# Altium footprint library LimeMicroAltiumLib.PcbLib: 876 footprints (part 9 of 57)
Each footprint in its own frame and in the unit in brackets; x right, y up, seen from the top. Pads: shape width x height; smd on the part's side, far side on the other; paste and mask are expansions set on the pad; w line width, h text height; cw(c..) or ccw(c..) is an arc to the next point about the centre after c.
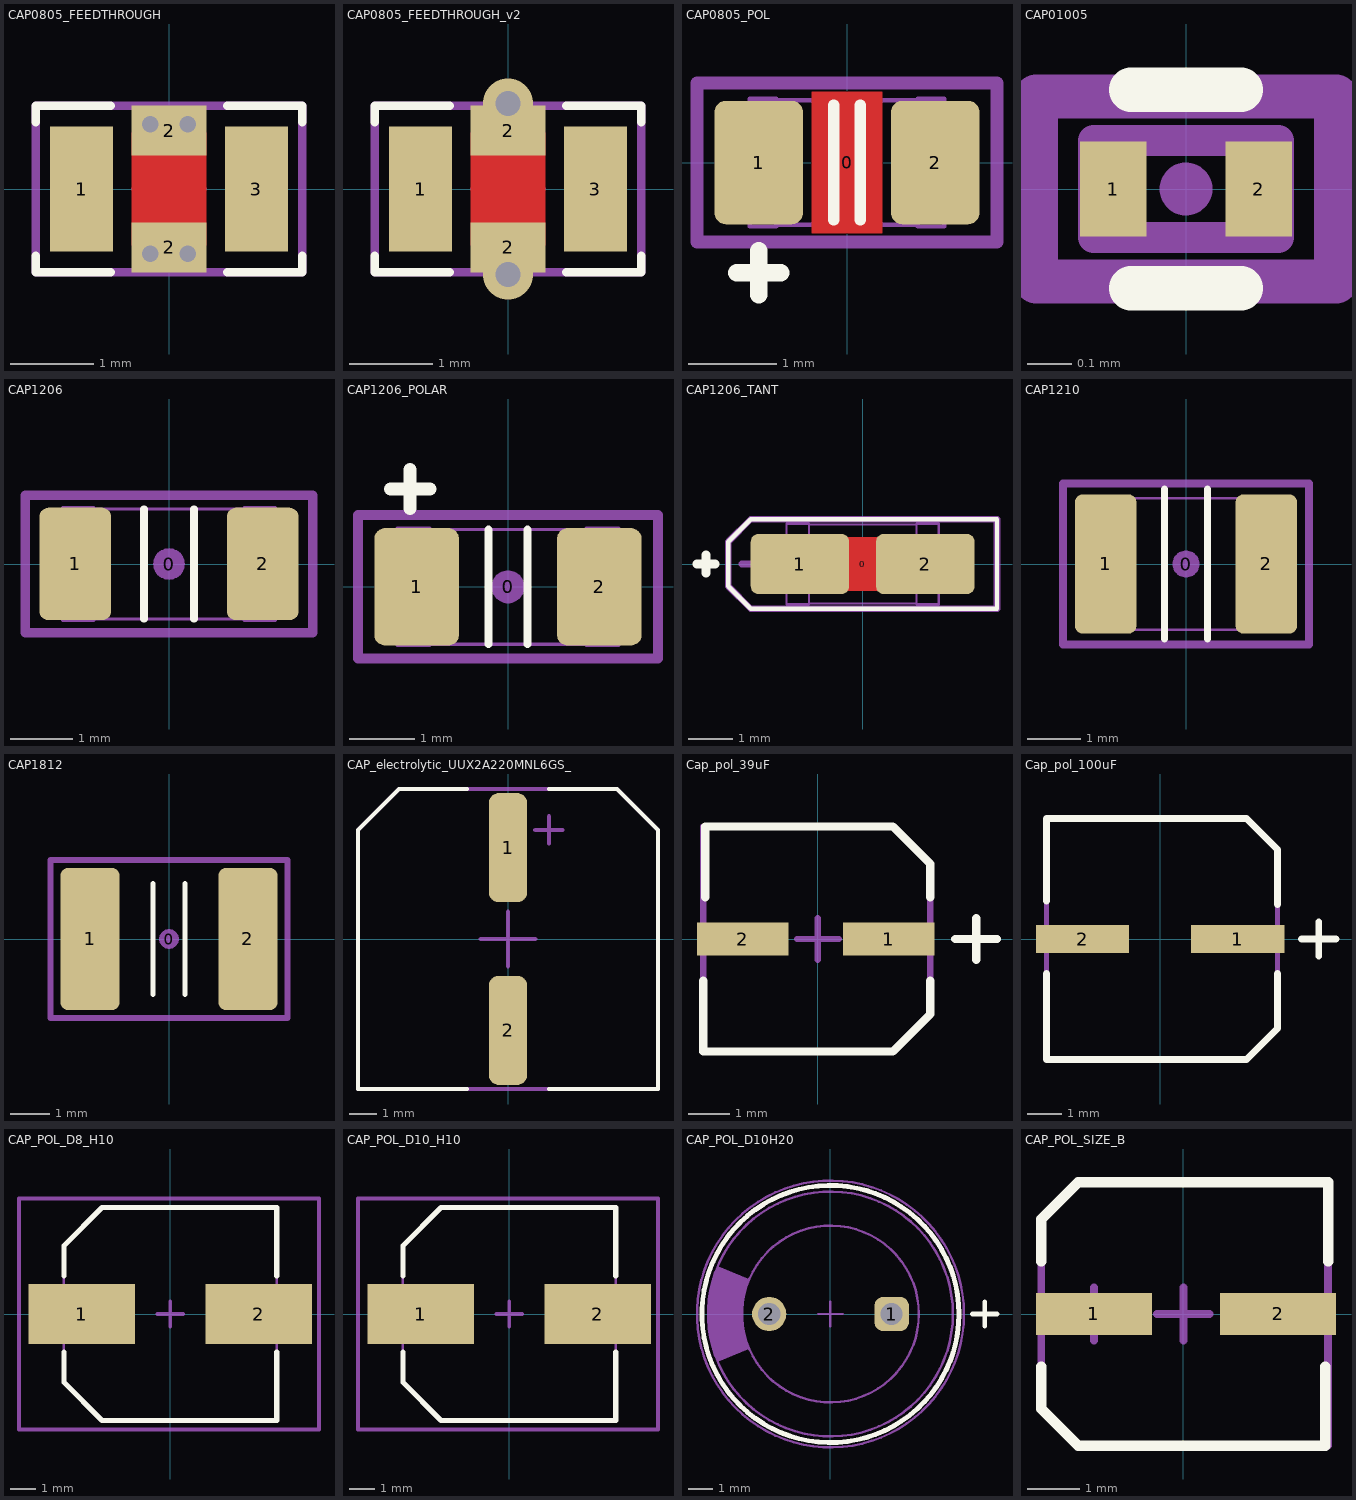
[diagram p8: the footprints below, top view; thin cyan lines are the x and y axes]

## CAP0805_FEEDTHROUGH [mm]
pads (4):
  rect 0.75x1.5 smd mask+0.05: 1(-1.05,0) 3(1.05,0)
  rect 0.9x0.6 smd mask+0.05: 2(0,-0.7) 2(0,0.7)
via 0.225,0.775 diameter 0.4 hole 0.2
via -0.225,0.775 diameter 0.4 hole 0.2
via 0.225,-0.775 diameter 0.4 hole 0.2
via -0.225,-0.775 diameter 0.4 hole 0.2
Top Layer:
  region: 0.375,0.425
  region: -0.45,-0.675 -0.45,0.675 0.45,0.675 0.45,-0.675
  region: -0.375,-0.4
Top Overlay:
  lines w0.1: -1.6,-0.8 -1.6,-1 -0.7,-1 ; -1.6,0.8 -1.6,1 -0.7,1 ; 0.7,-1 1.6,-1 1.6,-0.8 ; 0.7,1 1.6,1 1.6,0.8
Mechanical 15:
  lines w0.1: -0.4,0 0,0 ; 0,-0.4 0,0 ; 0,0.4 0,0 ; 0.4,0 0,0 ; -1.6,-1 1.6,-1 1.6,1 -1.6,1 -1.6,-1
  text ".Designator" at 0,0 h0.55
3D body "User Library-0805_3Pin_Capacitor.step": height 1.13, standoff -0.01, extent -1,-0.625 1,0.625

## CAP0805_FEEDTHROUGH_v2 [mm]
pads (4):
  rect 0.75x1.5 smd mask+0.05: 1(-1.05,0) 3(1.05,0)
  rect 0.9x0.6 smd mask+0.05: 2(0,-0.7) 2(0,0.7)
via 0,1.025 diameter 0.6 hole 0.3
via 0,-1.025 diameter 0.6 hole 0.3
Top Layer:
  region: 0.375,0.425
  region: -0.45,-0.675 -0.45,0.675 0.45,0.675 0.45,-0.675
  region: -0.375,-0.4
Top Overlay:
  lines w0.1: -1.6,-0.8 -1.6,-1 -0.7,-1 ; -1.6,0.8 -1.6,1 -0.7,1 ; 0.7,-1 1.6,-1 1.6,-0.8 ; 0.7,1 1.6,1 1.6,0.8
Mechanical 15:
  lines w0.1: -0.4,0 0,0 ; 0,-0.4 0,0 ; 0,0.4 0,0 ; 0.4,0 0,0 ; -1.6,-1 1.6,-1 1.6,1 -1.6,1 -1.6,-1
  text ".Designator" at 0,0 h0.55
3D body "User Library-0805_3Pin_Capacitor.step": height 1.13, standoff -0.01, extent -1,-0.625 1,0.625

## CAP0805_POL [mm] "Chip Capacitor, Body 2.0x1.2mm, 0805, IPC Medium Density"
height 1.2
pads (3):
  round 0.254 on Mech15: 0(0,0)
  rrect25% 1x1.4 smd: 1(-1,0) 2(1,0)
Top Layer:
  pour cut-out: -0.4,0.8 0.4,0.8 0.4,-0.8 -0.4,-0.8
Top Overlay:
  lines w0.127: -0.15,-0.651 -0.15,0.651 ; 0.15,-0.651 0.15,0.651
  lines w0.2: -1.25,-1.25 -0.75,-1.25 ; -1,-1.5 -1,-1
Mechanical 13:
  lines w0.05: -0.8,-0.705 0.8,-0.705 ; -0.8,0.705 0.8,0.705 ; -1.1,-0.725 -0.8,-0.725 -0.8,0.725 -1.1,0.725 -1.1,-0.725 ; 0.8,-0.725 0.8,0.725 1.1,0.725 1.1,-0.725 0.8,-0.725
Mechanical 15:
  lines w0.15: -1.2,0 -0.7,0 ; -0.95,-0.25 -0.95,0.25 ; -1.7,-0.9 1.7,-0.9 1.7,0.9 -1.7,0.9 -1.7,-0.9
  text ".Designator" at 0,0 h0.55
3D body "CAP_0805.STEP": height 1.34, standoff -0.01, extent -1.1,-0.725 1.1,0.725

## CAP01005 [mm]
pads (2):
  rect 0.15x0.215 smd paste+0 mask+0.03: 1(-0.165,0) 2(0.165,0)
Top Overlay:
  lines w0.1: -0.125,-0.225 0.125,-0.225 ; -0.125,0.225 0.125,0.225
Mechanical 13:
  lines w0.07: -0.21,-0.11 -0.21,0.11 0.21,0.11 0.21,-0.11 -0.21,-0.11
Mechanical 15:
  circle w0.07: c0,0 r0.025
  lines w0.1: -0.34,-0.21 -0.34,0.21 0.34,0.21 0.34,-0.21 -0.34,-0.21
  text ".Designator" at 0,0 h0.55
3D body "Cap_Murata_GRM0225C1H3R4CA03L_eec.STEP": height 0.25, standoff 0, extent -0.34,-0.21 0.34,0.21

## CAP1206 [mm] "Chip Capacitor, Body 3.2x1.6mm, 1206, IPC Medium Density"
height 1.6
pads (3):
  round 0.508 on Mech15: 0(0,0)
  rrect25% 1.15x1.8 smd: 1(-1.5,0) 2(1.5,0)
Top Overlay:
  lines w0.127: -0.4,-0.876 -0.4,0.876 ; 0.4,-0.876 0.4,0.876
Mechanical 13:
  lines w0.05: -1.2,-0.88 1.2,-0.88 ; -1.2,0.88 1.2,0.88 ; -1.7,-0.9 -1.2,-0.9 -1.2,0.9 -1.7,0.9 -1.7,-0.9 ; 1.2,-0.9 1.7,-0.9 1.7,0.9 1.2,0.9 1.2,-0.9
Mechanical 15:
  lines w0.15: -2.3,-1.1 -2.3,1.1 2.3,1.1 2.3,-1.1 -2.3,-1.1
  text ".Designator" at 0,0 h0.55
3D body "CAP_1206.STEP": height 1.74, standoff -0.01, extent -1.7,-0.9 1.7,0.9

## CAP1206_POLAR [mm]
height 1.6
pads (3):
  round 0.508 on Mech15: 0(0,0)
  rrect25% 1.3x1.8 smd: 1(-1.4,0) 2(1.4,0)
Top Overlay:
  lines w0.127: -0.3,-0.876 -0.3,0.876 ; 0.3,-0.876 0.3,0.876
  lines w0.2: -1.8,1.5 -1.2,1.5 ; -1.5,1.2 -1.5,1.8
Mechanical 13:
  lines w0.05: -1.2,-0.88 1.2,-0.88 ; -1.2,0.88 1.2,0.88 ; -1.7,-0.9 -1.7,0.9 -1.2,0.9 -1.2,-0.9 -1.7,-0.9 ; 1.2,-0.9 1.2,0.9 1.7,0.9 1.7,-0.9 1.2,-0.9
Mechanical 15:
  lines w0.15: -1.6,0 -1.2,0 ; -1.4,-0.2 -1.4,0.2 ; -2.3,-1.1 2.3,-1.1 2.3,1.1 -2.3,1.1 -2.3,-1.1
  text ".Designator" at 0,0 h0.55
  text "Anode" at -2,-0.8 h0.3
3D body "User Library-CAP_TANT_3216-18_A_case-1.step": height 1.7, standoff 0, extent -1.7,-0.9 1.7,0.9

## CAP1206_TANT [mm] "Chip Capacitor, Body 1.6x0.8mm, 0603, IPC Medium Density"
height 0.8
pads (3):
  round 0.254 on Mech15: 0(0,0)
  rrect25% 2.2x1.35 smd: 1(-1.4,0) 2(1.4,0)
Top Layer:
  pour cut-out: -0.4,0.6 0.4,0.6 0.4,-0.6 -0.4,-0.6
Top Overlay:
  lines w0.1: -3,-0.5 -2.5,-1 3,-1 3,1 -2.5,1 -3,0.5 -3,-0.5
  lines w0.2: -3.7,0 -3.3,0 ; -3.5,-0.2 -3.5,0.2
Mechanical 13:
  lines w0.05: -1.2,-0.88 1.2,-0.88 ; -1.2,0.88 1.2,0.88 ; -1.7,-0.9 -1.2,-0.9 -1.2,0.9 -1.7,0.9 -1.7,-0.9 ; 1.2,-0.9 1.7,-0.9 1.7,0.9 1.2,0.9 1.2,-0.9
Mechanical 15:
  lines w0.15: -2.7,0 -1.7,0 ; -2.2,-0.5 -2.2,0.5 ; -3,-0.5 -3,0.5 -2.5,1 3,1 3,-1 -2.5,-1 -3,-0.5
  text ".Designator" at 0,0 h0.55
3D body "CAP_1206.STEP": height 1.74, standoff -0.01, extent -1.7,-0.9 1.7,0.9

## CAP1210 [mm] "Chip Capacitor, Body 3.2x2.5mm, 1210, IPC Medium Density"
height 1.6
pads (3):
  round 0.508 on Mech15: 0(0,0)
  rrect25% 1.15x2.6 smd: 1(-1.5,0) 2(1.5,0)
Top Overlay:
  lines w0.127: -0.4,-1.4 -0.4,1.4 ; 0.4,-1.4 0.4,1.4
Mechanical 13:
  lines w0.05: -1.2,-1.25 -1.6,-1.25 -1.6,1.25 -1.2,1.25 ; 1.2,-1.25 1.6,-1.25 1.6,1.25 1.2,1.25 ; -1.2,-1.23 1.2,-1.23 1.2,1.23 -1.2,1.23 -1.2,-1.23
Mechanical 15:
  lines w0.15: -2.3,-1.5 -2.3,1.5 2.3,1.5 2.3,-1.5 -2.3,-1.5
  text ".Designator" at 0,0 h0.55
3D body "User Library-CAPC3225X13.step": height 1.29, standoff -0.01, extent -1.6,-1.25 1.6,1.25

## CAP1812 [mm] "Chip Capacitor, Body 3.2x2.5mm, 1210, IPC Medium Density"
height 1.6
pads (3):
  round 0.508 on Mech15: 0(0,0)
  rrect25% 1.5x3.6 smd: 1(-2,0) 2(2,0)
Top Overlay:
  lines w0.127: -0.4,-1.4 -0.4,1.4 ; 0.4,-1.4 0.4,1.4
Mechanical 15:
  lines w0.15: -3,-2 -3,2 3,2 3,-2 -3,-2
  text ".Designator" at 0,0 h0.55
3D body "C1812C102KGRACTU.step": height 1.54, standoff -0.01, extent -2.4,-1.7 2.4,1.8

## CAP_electrolytic_UUX2A220MNL6GS_ [mm] "22uF 100V"
pads (2):
  rrect50% 1.4x4 smd mask+0.05: 1(0,3.35) 2(0,-3.35)
Top Overlay:
  lines w0.15: -1.5,-5.5 -5.5,-5.5 -5.5,4 -4,5.5 -1.5,5.5 ; 1.5,-5.5 5.5,-5.5 5.5,4 4,5.5 1.5,5.5
Mechanical 15:
  lines w0.15: -1,0 1,0 ; 0,-1 0,1 ; 1,4 2,4 ; 1.5,3.5 1.5,4.5 ; -5.5,-5.5 5.5,-5.5 5.5,4 4,5.5 -4,5.5 -5.5,4 -5.5,-5.5
  text ".Designator" at 0,0 h0.55
3D body "User Library-AL_EL_cap_8mmx10mm.STEP": height 10.3, standoff -0.2, extent -4.25,-4.848 4.25,4.852

## Cap_pol_39uF [mm]
pads (2):
  rect 2.2x0.8 smd: 1(1.7,0) 2(-1.8,0)
Top Overlay:
  lines w0.2: -2.75,-1 -2.75,-2.7 1.8,-2.7 2.7,-1.8 2.7,-1 ; -2.7,1 -2.7,2.7 1.8,2.7 2.7,1.8 2.7,1 ; 3.3,0 4.3,0 ; 3.8,-0.5 3.8,0.5
Mechanical 15:
  lines w0.15: -0.5,0 0.5,0 ; 0,-0.5 0,0.5 ; 3.3,0 4.3,0 ; 3.8,-0.5 3.8,0.5 ; -2.75,-2.7 -2.75,2.7 1.8,2.7 2.7,1.8 2.7,-1.8 1.8,-2.7 -2.75,-2.7
  text ".Designator" at 0,0 h0.55
3D body: height 2, standoff 0, extent -2.65,-2.65 2.65,2.65
3D body: height 6, standoff 0, extent -2.232,-2.241 2.25,2.25

## Cap_pol_100uF [mm]
pads (2):
  rect 2.7x0.8 smd: 1(2.25,0) 2(-2.25,0)
Top Overlay:
  lines w0.2: -3.3,-1 -3.3,-3.5 2.5,-3.5 3.4,-2.6 3.4,-1 ; -3.3,1.1 -3.3,3.5 2.5,3.5 3.4,2.6 3.4,1 ; 4.1,0 5.1,0 ; 4.6,-0.5 4.6,0.5
Mechanical 15:
  lines w0.15: 4.1,0 5.1,0 ; 4.6,-0.5 4.6,0.5 ; -3.3,-3.5 -3.3,-1 -3.3,3.5 2.5,3.5 3.4,2.6 3.4,-2.6 2.5,-3.5 -3.3,-3.5
  text ".Designator" at 0,0 h0.55

## CAP_POL_D8_H10 [mm] "Aluminum Electrolytic Capacitor, Body 8,30x8,30x10,50mm, IPC Low Density"
height 10.5
pads (2):
  rect 4.15x2.35 smd: 1(-3.45,0) 2(3.45,0)
Top Overlay:
  lines w0.2: -4.15,-1.475 -4.15,-2.663 -2.663,-4.15 4.15,-4.15 4.15,-1.475 ; -4.15,1.475 -4.15,2.662 -2.663,4.15 4.15,4.15 4.15,1.475
Mechanical 13:
  lines w0.1: -4.15,-2.663 -2.663,-4.15 4.15,-4.15 4.15,4.15 -2.663,4.15 -4.15,2.662 -4.15,-2.663
Mechanical 15:
  lines w0.15: -0.5,0 0.5,0 ; 0,-0.5 0,0.5 ; -5.9,-4.5 -5.9,4.5 5.8,4.5 5.8,-4.5 -5.9,-4.5
  text ".Designator" at 0,0 h0.55
3D body: height 3.5, standoff 0, extent -4.15,-4.15 4.15,4.15
3D body: height 10.5, standoff 0, extent -4,-4 3.968,3.984

## CAP_POL_D10_H10 [mm] "Aluminum Electrolytic Capacitor, Body 8,30x8,30x10,50mm, IPC Low Density"
height 10.5
pads (2):
  rect 4.15x2.35 smd: 1(-3.45,0) 2(3.45,0)
Top Overlay:
  lines w0.2: -4.15,-1.475 -4.15,-2.663 -2.663,-4.15 4.15,-4.15 4.15,-1.475 ; -4.15,1.475 -4.15,2.662 -2.663,4.15 4.15,4.15 4.15,1.475
Mechanical 13:
  lines w0.1: -4.15,-2.663 -4.15,2.662 -2.663,4.15 4.15,4.15 4.15,-4.15 -2.663,-4.15 -4.15,-2.663
Mechanical 15:
  lines w0.15: -0.5,0 0.5,0 ; 0,-0.5 0,0.5 ; -5.9,-4.5 5.8,-4.5 5.8,4.5 -5.9,4.5 -5.9,-4.5
  text ".Designator" at 0,0 h0.55
3D body: height 10.5, standoff 0, extent -4,-4 3.968,3.984
3D body: height 3.5, standoff 0, extent -4.15,-4.15 4.15,4.15

## CAP_POL_D10H20 [mm] "Aluminum Electrolytic Capacitors, 10x20mm"
height 20
pads (2):
  rrect50% 1.4x1.4 hole 0.9: 1(2.5,0)
  round 1.4 hole 0.9: 2(-2.5,0)
Top Overlay:
  circle w0.2: c0,0 r5.25
  lines w0.2: 5.8,0 6.8,0 ; 6.3,-0.5 6.3,0.5
Mechanical 15:
  circle w0.1: c0,0 r5.45
  circle w0.1: c0,0 r3.61
  circle w0.1: c0,0 r5
  region: -4.607,-1.944 -3.323,-1.41 -3.324,-1.409 -3.39,-1.24 -3.497,-0.895 -3.569,-0.541 -3.605,-0.181 -3.605,0.181 -3.569,0.541 -3.497,0.895 -3.39,1.24 -3.324,1.409 -3.323,1.41 -4.607,1.944 -4.704,1.714 -4.851,1.237 -4.95,0.747 -5,0.25 -5,-0.25 -4.95,-0.747 -4.851,-1.237 -4.704,-1.714
  lines w0.1: -0.5,0 0.5,0 ; 0,-0.5 0,0.5
  lines w0.2: -3,0 -2,0 ; 2,0 3,0 ; 2.5,-0.5 2.5,0.5
  text ".Designator" at 0,0 h0.55
3D body "10x20x5x0.6.stp": height 20.31, standoff -19.91, extent -4.99,-5 5,5

## CAP_POL_SIZE_B [mm]
height 10.5
pads (2):
  rect 2.2x0.8 smd: 1(-1.7,0) 2(1.8,0)
Top Overlay:
  lines w0.2: -2.7,-1 -2.7,-1.8 -2,-2.5 2.7,-2.5 2.7,-1 ; -2.7,1 -2.7,1.8 -2,2.5 2.75,2.5 2.75,1
Mechanical 15:
  lines w0.15: -2.2,0 -1.2,0 ; -1.7,-0.5 -1.7,0.5 ; -0.5,0 0.5,0 ; 0,-0.5 0,0.5 ; -2.7,-1.8 -2.7,1.8 -2,2.5 2.75,2.5 2.75,-2.5 -2,-2.5 -2.7,-1.8
  text ".Designator" at 0,0 h0.55
3D body "â¦4 SIZE CODE B.stp": height 5.8, standoff 0, extent -2.5,-2.15 2.5,2.15